# Altium footprint library Amin-Library.PcbLib: 601 footprints (part 16 of 38)
Each footprint in its own frame and in the unit in brackets; x right, y up, seen from the top. Pads: shape width x height; smd on the part's side, far side on the other; paste and mask are expansions set on the pad; w line width, h text height; cw(c..) or ccw(c..) is an arc to the next point about the centre after c.
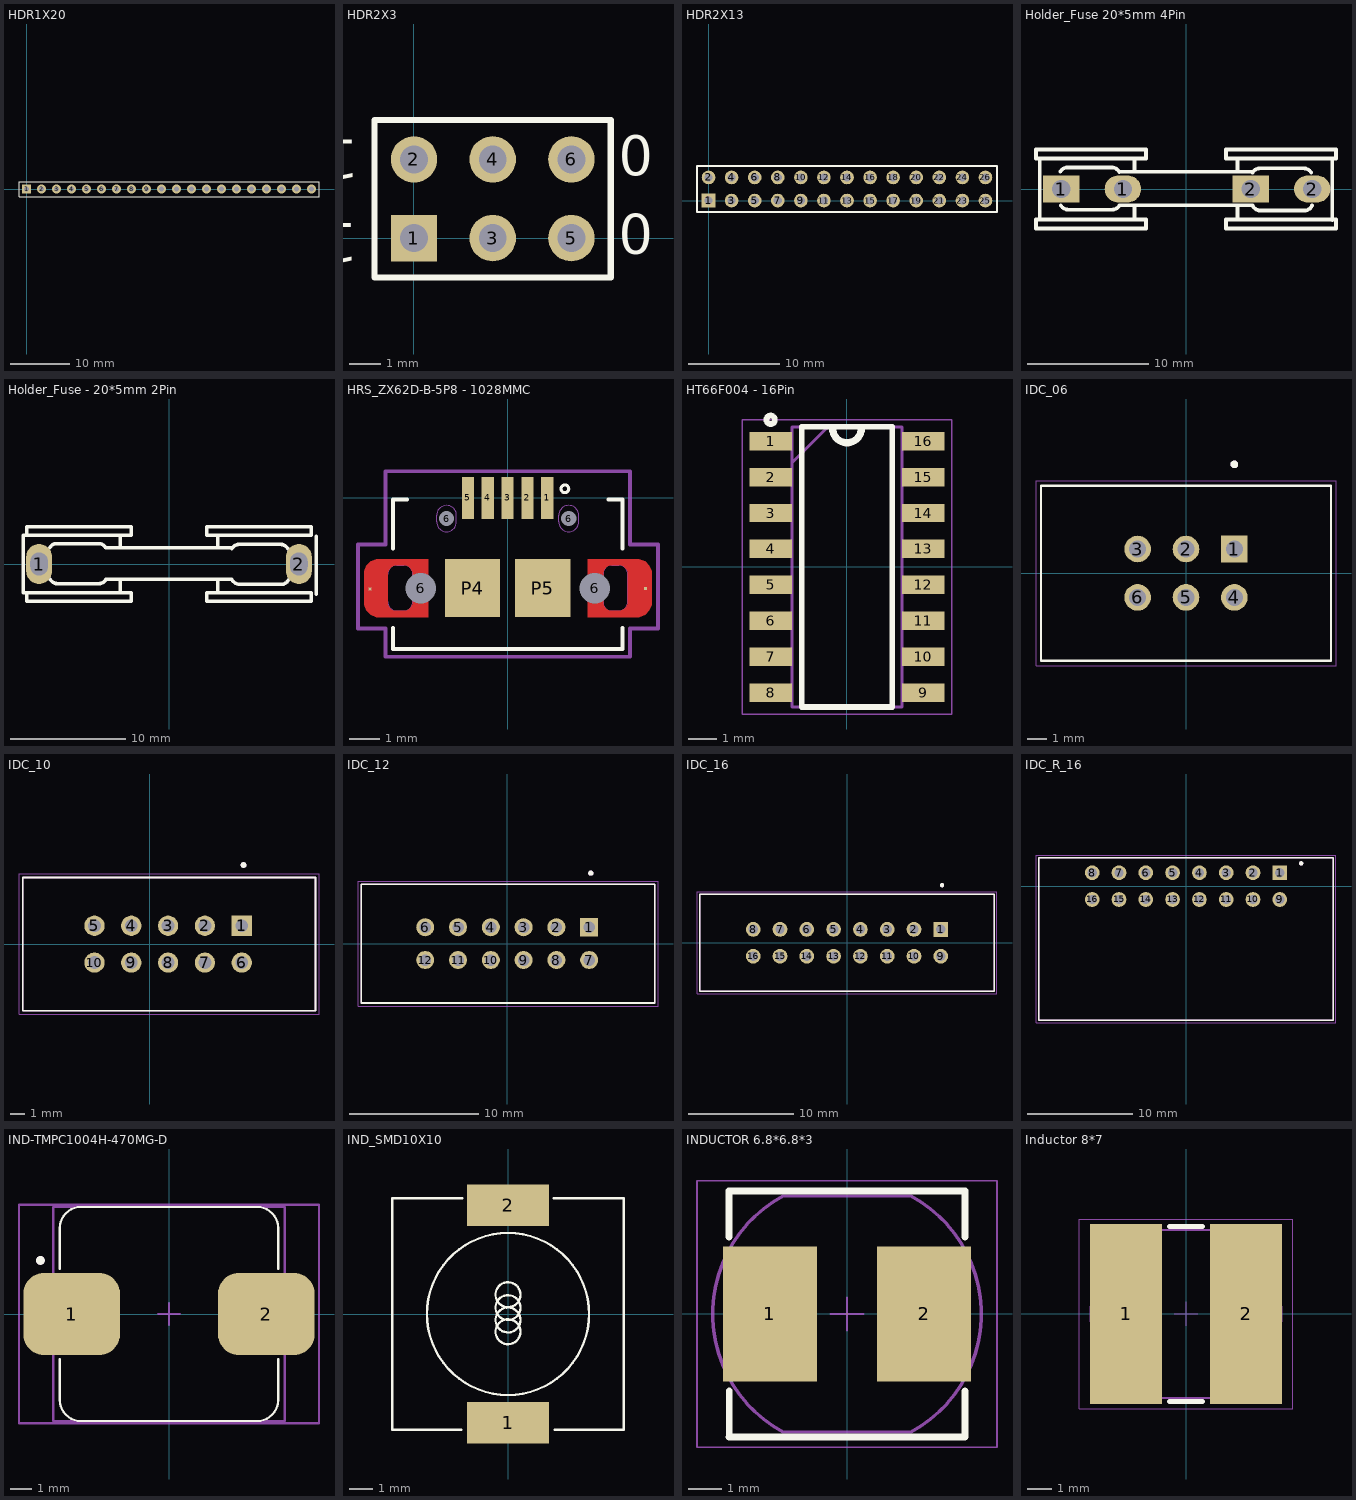
[diagram p15: the footprints below, top view; thin cyan lines are the x and y axes]

## HDR1X20 [mm] "Connector; Header; 20 Position"
height 4.32
pads (20):
  rect 1.5x1.5 hole 0.9: 1(0,0)
  round 1.5 hole 0.9: 2(2.54,0) 3(5.08,0) 4(7.62,0) 5(10.16,0) 6(12.7,0) 7(15.24,0) 8(17.78,0) 9(20.32,0) 10(22.86,0) 11(25.4,0) 12(27.94,0) 13(30.48,0) 14(33.02,0) 15(35.56,0) 16(38.1,0) 17(40.64,0) 18(43.18,0) 19(45.72,0) 20(48.26,0)
Top Overlay:
  lines w0.2: -1.27,-1.27 -1.27,1.27 0.635,1.27 49.53,1.27 49.53,-1.27 -1.27,-1.27

## HDR2X3 [mm] "Connector; Header; 3x2 Position"
height 4.32
pads (6):
  rect 1.5x1.5 hole 0.9: 1(0,0)
  round 1.5 hole 0.9: 2(0,2.54) 3(2.54,0) 4(2.54,2.54) 5(5.08,0) 6(5.08,2.54)
Top Overlay:
  lines w0.2: 1.482,-1.27 6.35,-1.27 ; 6.35,-1.27 6.35,3.81 -1.27,3.81 -1.27,-1.27 6.35,-1.27
  text "0" at 6.604,2.032 h1.27
  text "0" at 6.604,-0.508 h1.27
  text "1" at -1.778,3.175 h1.27
  text "1" at -1.807,0.486 h1.27
3D body "Header 2x3.stp": height 10.68, standoff -2.78, extent -1.27,-1.372 6.35,3.657

## HDR2X13 [mm] "Connector; Header; 13x2 Position"
pads (26):
  rect 1.5x1.5 hole 0.9: 1(0,0)
  round 1.5 hole 0.9: 2(0,2.54) 3(2.54,0) 4(2.54,2.54) 5(5.08,0) 6(5.08,2.54) 7(7.62,0) 8(7.62,2.54) 9(10.16,0) 10(10.16,2.54) 11(12.7,0) 12(12.7,2.54) 13(15.24,0) 14(15.24,2.54) 15(17.78,0) 16(17.78,2.54) 17(20.32,0) 18(20.32,2.54) 19(22.86,0) 20(22.86,2.54) 21(25.4,0) 22(25.4,2.54) 23(27.94,0) 24(27.94,2.54) 25(30.48,0) 26(30.48,2.54)
Top Overlay:
  lines w0.2: -1.27,-1.27 31.75,-1.27 31.75,3.81 -1.27,3.81 -1.27,-1.27

## Holder_Fuse 20*5mm 4Pin [mm]
height 16
pads (4):
  rect 3x2.25 hole 1.5: 1(-10.287,0) 2(5.334,0)
  oval 3x2.25 hole 1.5: 1(-5.207,0) 2(10.414,0)
Top Overlay:
  lines w0.305: -12.37,3.226 -12.37,2.515 -3.302,2.515 -3.302,3.251 -12.37,3.251 ; -12.065,-2.515 -12.065,2.515 ; -10.37,1.422 cw(c-9.754,1.067) -9.754,1.778 -8.687,1.778 -6.147,1.778 cw(c-6.147,1.041) -5.509,1.41 ; -10.341,-1.333 ccw(c-9.703,-0.965) -9.703,-1.702 ; -9.855,-1.702 -5.969,-1.702 ; -6.096,-1.702 ccw(c-6.096,-0.991) -5.48,-1.346 ; -5.512,1.422 5.537,1.422 ; -5.486,-1.346 5.461,-1.346 ; -4.242,-2.464 -4.242,-1.346 ; -4.242,1.448 -4.242,2.489 ; -3.302,-3.251 -12.37,-3.251 -12.37,-2.515 -3.302,-2.515 -3.302,-3.226 ; 3.302,3.226 3.302,2.515 12.37,2.515 12.37,3.251 3.302,3.251 ; 4.242,-2.489 4.242,-1.346 ; 4.242,1.422 4.242,2.464 ; 5.479,-1.353 ccw(c6.147,-1.041) 6.147,-1.778 8.687,-1.778 9.754,-1.778 ccw(c9.754,-1.067) 10.398,-1.367 ; 5.48,1.346 cw(c6.096,0.991) 6.096,1.702 ; 5.969,1.702 9.855,1.702 ; 9.703,1.702 cw(c9.703,0.965) 10.341,1.333 ; 12.065,-2.565 12.065,2.464 ; 12.37,-3.251 3.302,-3.251 3.302,-2.515 12.37,-2.515 12.37,-3.226
3D body "User Library-FH-103 fuse holder 6_4mm.step": height 10.7, standoff -2.99, extent 5.199,-3.632 13.201,3.378
3D body "User Library-FH-103 fuse holder 6_4mm.step": height 10.7, standoff -2.99, extent -13.074,-3.378 -5.072,3.632

## Holder_Fuse - 20*5mm 2Pin [mm]
height 16
pads (2):
  oval 2.25x3.5 hole 1.5 slot 2 at 90 deg: 1(-11.3,0) 2(11.3,0)
Top Overlay:
  lines w0.305: -12.37,-2.515 -12.37,-3.251 -3.302,-3.251 ; -12.37,2.515 -12.37,3.226 ; -12.37,3.251 -3.302,3.251 -3.302,2.515 -12.7,2.515 -12.7,-2.515 -3.302,-2.515 -3.302,-3.226 ; -10.37,1.422 cw(c-9.754,1.067) -9.754,1.778 -8.687,1.778 -6.147,1.778 cw(c-6.147,1.041) -5.509,1.41 ; -10.341,-1.333 ccw(c-9.703,-0.965) -9.703,-1.702 ; -9.855,-1.702 -5.969,-1.702 ; -6.096,-1.702 ccw(c-6.096,-0.991) -5.48,-1.346 ; -5.512,1.422 5.537,1.422 ; -5.486,-1.346 5.461,-1.346 ; -4.242,-2.464 -4.242,-1.346 ; -4.242,1.448 -4.242,2.489 ; 3.302,3.226 3.302,2.515 12.37,2.515 12.37,3.251 3.302,3.251 ; 4.242,-2.489 4.242,-1.346 ; 4.242,1.422 4.242,2.464 ; 5.479,-1.353 ccw(c6.147,-1.041) 6.147,-1.778 8.687,-1.778 9.754,-1.778 ccw(c9.754,-1.067) 10.398,-1.367 ; 5.48,1.346 cw(c6.096,0.991) 6.096,1.702 ; 5.969,1.702 9.855,1.702 ; 9.703,1.702 cw(c9.703,0.965) 10.341,1.333 ; 12.37,-3.251 3.302,-3.251 3.302,-2.515 12.37,-2.515 12.37,-3.226 ; 12.827,-2.616 12.827,2.413
3D body "User Library-Fuse_Holder_PCB.step": height 13.5, standoff -4.5, extent -12,-4.5 12,4.5

## HRS_ZX62D-B-5P8 - 1028MMC [mm]
pads (13):
  rect 0.4x1.372 smd: 1(1.3,0) 2(0.65,0) 3(0,0) 4(-0.65,0) 5(-1.3,0)
  round 0.61 hole 1: 6(-2.85,-2.95) 6(2.85,-2.95)
  round 0.406 hole 0.5: 6(-2,-0.675) 6(2,-0.675)
  rect 0.102x0.102 smd: P3(-4.513,-2.987) P6(4.521,-2.963)
  rect 1.803x1.905 smd: P4(-1.15,-2.95) P5(1.15,-2.95)
Top Layer:
  region: -2.6,-2 -4.2,-2 -4.299,-2 -4.483,-2.076 -4.624,-2.217 -4.7,-2.401 -4.7,-2.5 -4.7,-2.95 -3.925,-2.95 -3.925,-2.5 -3.919,-2.441 -3.874,-2.333 -3.792,-2.251 -3.684,-2.206 -3.625,-2.2 -3.4,-2.2 -3.341,-2.206 -3.233,-2.251 -3.151,-2.333 -3.106,-2.441 -3.1,-2.5 -3.1,-2.95 -2.6,-2.95
  region: 2.616,-3.9 4.216,-3.9 4.317,-3.901 4.503,-3.826 4.645,-3.685 4.724,-3.5 4.724,-3.4 4.724,-2.95 3.937,-2.95 3.937,-3.4 3.931,-3.459 3.885,-3.568 3.801,-3.65 3.691,-3.695 3.632,-3.7 3.404,-3.7 3.347,-3.692 3.244,-3.645 3.167,-3.563 3.128,-3.457 3.124,-3.4 3.124,-2.95 2.616,-2.95
  region: -3.1,-2.95 -2.6,-2.95 -2.6,-3.9 -4.2,-3.9 -4.299,-3.9 -4.483,-3.824 -4.624,-3.683 -4.7,-3.499 -4.7,-3.4 -4.7,-2.95 -3.925,-2.95 -3.925,-3.425 -3.92,-3.479 -3.879,-3.578 -3.803,-3.654 -3.704,-3.695 -3.65,-3.7 -3.4,-3.7 -3.341,-3.694 -3.233,-3.649 -3.151,-3.567 -3.106,-3.459 -3.1,-3.4
  region: 3.124,-2.95 2.616,-2.95 2.616,-2 4.216,-2 4.317,-1.999 4.503,-2.074 4.645,-2.215 4.724,-2.4 4.724,-2.5 4.724,-2.95 3.937,-2.95 3.937,-2.475 3.931,-2.421 3.889,-2.321 3.812,-2.245 3.712,-2.205 3.658,-2.2 3.404,-2.2 3.347,-2.208 3.244,-2.255 3.167,-2.337 3.128,-2.443 3.124,-2.5
Top Overlay:
  circle w0.1: c1.875,0.3 r0.127
  lines w0.127: -3.75,-4.25 -3.75,-4.95 3.759,-4.95 3.759,-4.25 ; -3.75,-1.65 -3.75,-0.046 -3.3,-0.046 ; 3.302,-0.046 3.759,-0.046 3.759,-1.65
Top Paste:
  region: -2.6,-2 -4.2,-2 -4.299,-2 -4.483,-2.076 -4.624,-2.217 -4.7,-2.401 -4.7,-2.5 -4.7,-2.95 -3.925,-2.95 -3.925,-2.5 -3.919,-2.441 -3.874,-2.333 -3.792,-2.251 -3.684,-2.206 -3.625,-2.2 -3.4,-2.2 -3.341,-2.206 -3.233,-2.251 -3.151,-2.333 -3.106,-2.441 -3.1,-2.5 -3.1,-2.95 -2.6,-2.95
  region: 2.616,-3.9 4.216,-3.9 4.317,-3.901 4.503,-3.826 4.645,-3.685 4.724,-3.5 4.724,-3.4 4.724,-2.95 3.937,-2.95 3.937,-3.4 3.931,-3.459 3.885,-3.568 3.801,-3.65 3.691,-3.695 3.632,-3.7 3.404,-3.7 3.347,-3.692 3.244,-3.645 3.167,-3.563 3.128,-3.457 3.124,-3.4 3.124,-2.95 2.616,-2.95
  region: -3.1,-2.95 -2.6,-2.95 -2.6,-3.9 -4.2,-3.9 -4.299,-3.9 -4.483,-3.824 -4.624,-3.683 -4.7,-3.499 -4.7,-3.4 -4.7,-2.95 -3.925,-2.95 -3.925,-3.425 -3.92,-3.479 -3.879,-3.578 -3.803,-3.654 -3.704,-3.695 -3.65,-3.7 -3.4,-3.7 -3.341,-3.694 -3.233,-3.649 -3.151,-3.567 -3.106,-3.459 -3.1,-3.4
  region: 3.124,-2.95 2.616,-2.95 2.616,-2 4.216,-2 4.317,-1.999 4.503,-2.074 4.645,-2.215 4.724,-2.4 4.724,-2.5 4.724,-2.95 3.937,-2.95 3.937,-2.475 3.931,-2.421 3.889,-2.321 3.812,-2.245 3.712,-2.205 3.658,-2.2 3.404,-2.2 3.347,-2.208 3.244,-2.255 3.167,-2.337 3.128,-2.443 3.124,-2.5
Top Solder:
  rectangle: -4.8,-4 -2.5,-1.9
  rectangle: 2.515,-4.001 4.801,-1.9
Mechanical 4:
Mechanical 11:
  lines w0.025: -3.925,-3.4 ccw(c-3.625,-3.4) -3.625,-3.7 -3.4,-3.7 ccw(c-3.4,-3.4) -3.1,-3.4 -3.1,-2.5 ccw(c-3.4,-2.5) -3.4,-2.2 -3.625,-2.2 ccw(c-3.625,-2.5) -3.925,-2.5 -3.925,-3.4 ; -2.325,-0.777 ccw(c-1.998,-0.778) -2,-1.105 ccw(c-2.002,-0.778) -1.675,-0.777 -1.675,-0.573 ccw(c-2.003,-0.571) -2,-0.243 ccw(c-1.997,-0.571) -2.325,-0.573 -2.325,-0.777 ; 1.67,-0.777 ccw(c1.999,-0.776) 2,-1.105 ccw(c2.001,-0.776) 2.33,-0.777 2.33,-0.573 ccw(c2,-0.573) 2,-0.243 ccw(c2,-0.573) 1.67,-0.573 1.67,-0.777 ; 3.124,-3.4 ccw(c3.414,-3.41) 3.404,-3.7 3.632,-3.7 ccw(c3.635,-3.398) 3.937,-3.4 3.937,-2.5 ccw(c3.635,-2.502) 3.632,-2.2 3.404,-2.2 ccw(c3.414,-2.49) 3.124,-2.5 3.124,-3.4
Mechanical 27:
  lines w0.127: -4.9,-4.275 -4.9,-1.525 -4,-1.525 -4,0.875 4.013,0.875 4.013,-1.525 4.925,-1.525 4.925,-4.275 4.013,-4.275 4.013,-5.2 -4,-5.2 -4,-4.275 -4.9,-4.275

## HT66F004 - 16Pin [mm] "NSOP-16"
height 22
pads (16):
  rect 1.5x0.65 smd: 1(-2.7,4.445) 2(-2.7,3.175) 3(-2.7,1.905) 4(-2.7,0.635) 5(-2.7,-0.635) 6(-2.7,-1.905) 7(-2.7,-3.175) 8(-2.7,-4.445) 9(2.7,-4.445) 10(2.7,-3.175) 11(2.7,-1.905) 12(2.7,-0.635) 13(2.7,0.635) 14(2.7,1.905) 15(2.7,3.175) 16(2.7,4.445)
Top Overlay:
  circle w0.2: c-2.7,5.2 r0.15
  lines w0.2: -1.6,-4.95 1.6,-4.95 1.6,4.95 -1.6,4.95 -1.6,-4.95
  lines w0.254: -0.508,4.897 ccw(c0,4.897) 0.508,4.897
Mechanical 13:
  lines w0.1: -1.95,3.68 -0.68,4.95 ; -1.95,-4.95 1.95,-4.95 1.95,4.95 -1.95,4.95 -1.95,-4.95
Mechanical 15:
  lines w0.05: -3.7,-5.2 3.7,-5.2 3.7,5.2 -3.7,5.2 -3.7,-5.2
3D body "BS816A-1.stp": height 1.75, standoff 0, extent -3,-4.95 3,4.95

## IDC_06 [mm]
pads (6):
  rect 1.398x1.398 hole 0.89: 1(2.54,1.27)
  round 1.398 hole 0.89: 2(0,1.27) 3(-2.54,1.27) 4(2.54,-1.27) 5(0,-1.27) 6(-2.54,-1.27)
Top Overlay:
  circle w0.2: c2.54,5.715 r0.1
  lines w0.127: -7.61,-4.595 7.61,-4.595 7.61,4.595 -7.61,4.595 -7.61,-4.595
Mechanical 4:
  circle w0.2: c2.54,5.715 r0.1
  circle w0.2: c2.54,5.715 r0.1
Mechanical 16:
  lines w0.05: -7.874,-4.845 7.874,-4.845 7.874,4.845 -7.874,4.845 -7.874,-4.845
3D body "User Library-BH-06 (IDC-06MS) (1).step": height 9, standoff -3, extent -7.61,-4.539 7.61,4.561

## IDC_10 [mm]
pads (10):
  rect 1.398x1.398 hole 0.89: 1(6.35,1.27)
  round 1.398 hole 0.89: 2(3.81,1.27) 3(1.27,1.27) 4(-1.27,1.27) 5(-3.81,1.27) 6(6.35,-1.27) 7(3.81,-1.27) 8(1.27,-1.27) 9(-1.27,-1.27) 10(-3.81,-1.27)
Top Overlay:
  circle w0.2: c6.477,5.461 r0.1
  lines w0.127: -8.763,-4.595 -8.763,4.595 11.43,4.595 11.43,-4.595 -8.763,-4.595
Mechanical 4:
  circle w0.2: c6.477,5.461 r0.1
  circle w0.2: c6.477,5.461 r0.1
  lines w0.127: -8.763,-4.595 -8.763,4.595 ; -8.763,-4.595 11.43,-4.595 ; -8.763,-4.595 -8.763,4.595 ; -8.763,-4.595 11.43,-4.595 ; -8.763,4.595 11.43,4.595 ; -8.763,4.595 11.43,4.595 ; 11.43,-4.595 11.43,4.595 ; 11.43,-4.595 11.43,4.595
Mechanical 16:
  lines w0.05: -9.017,-4.845 -9.017,4.845 11.68,4.845 11.68,-4.845 -9.017,-4.845
3D body "User Library-IDC Socket Male 10pin Straight THT Goldplated 2_54mm.step": height 8.91, standoff -3.49, extent -8.87,-4.425 11.43,4.425

## IDC_12 [mm]
pads (12):
  rect 1.398x1.398 hole 0.89: 1(6.35,1.27)
  round 1.398 hole 0.89: 2(3.81,1.27) 3(1.27,1.27) 4(-1.27,1.27) 5(-3.81,1.27) 6(-6.35,1.27) 7(6.35,-1.27) 8(3.81,-1.27) 9(1.27,-1.27) 10(-1.27,-1.27) 11(-3.81,-1.27) 12(-6.35,-1.27)
Top Overlay:
  circle w0.2: c6.477,5.461 r0.1
  lines w0.127: -11.303,-4.595 11.43,-4.595 11.43,4.595 -11.303,4.595 -11.303,-4.595
Mechanical 4:
  circle w0.2: c6.477,5.461 r0.1
  circle w0.2: c6.477,5.461 r0.1
  lines w0.127: -11.303,-4.595 11.43,-4.595 ; -11.303,-4.595 -11.303,4.595 ; -11.303,-4.595 11.43,-4.595 ; -11.303,-4.595 -11.303,4.595 ; -11.303,4.595 11.43,4.595 ; -11.303,4.595 11.43,4.595 ; 11.43,-4.595 11.43,4.595 ; 11.43,-4.595 11.43,4.595
Mechanical 16:
  lines w0.05: -11.557,-4.845 11.68,-4.845 11.68,4.845 -11.557,4.845 -11.557,-4.845
3D body "User Library-IDC Socket Male 12pin Straight THT Goldplated 2_54mm.SLDPRT": height 8.91, standoff -3.49, extent -11.357,-4.595 11.484,4.255

## IDC_16 [mm]
pads (16):
  rect 1.398x1.398 hole 0.89: 1(8.89,1.27)
  round 1.398 hole 0.89: 2(6.35,1.27) 3(3.81,1.27) 4(1.27,1.27) 5(-1.27,1.27) 6(-3.81,1.27) 7(-6.35,1.27) 8(-8.89,1.27) 9(8.89,-1.27) 10(6.35,-1.27) 11(3.81,-1.27) 12(1.27,-1.27) 13(-1.27,-1.27) 14(-3.81,-1.27) 15(-6.35,-1.27) 16(-8.89,-1.27)
Top Overlay:
  circle w0.2: c9.017,5.461 r0.1
  lines w0.127: -13.97,-4.595 13.97,-4.595 13.97,4.595 -13.97,4.595 -13.97,-4.595
Mechanical 4:
  circle w0.2: c9.017,5.461 r0.1
  circle w0.2: c9.017,5.461 r0.1
  lines w0.127: -13.97,-4.595 13.97,-4.595 ; -13.97,-4.595 -13.97,4.595 ; -13.97,-4.595 13.97,-4.595 ; -13.97,-4.595 -13.97,4.595 ; -13.97,4.595 13.97,4.595 ; -13.97,4.595 13.97,4.595 ; 13.97,-4.595 13.97,4.595 ; 13.97,-4.595 13.97,4.595
Mechanical 16:
  lines w0.05: -14.22,-4.845 14.22,-4.845 14.22,4.845 -14.22,4.845 -14.22,-4.845
3D body "DS1013-16S (IDC-16MS CONNFLY).stp": height 9, standoff -3.6, extent -14.06,-4.455 14.06,4.445

## IDC_R_16 [mm]
pads (16):
  rect 1.398x1.398 hole 0.89: 1(8.89,1.27)
  round 1.398 hole 0.89: 2(6.35,1.27) 3(3.81,1.27) 4(1.27,1.27) 5(-1.27,1.27) 6(-3.81,1.27) 7(-6.35,1.27) 8(-8.89,1.27) 9(8.89,-1.27) 10(6.35,-1.27) 11(3.81,-1.27) 12(1.27,-1.27) 13(-1.27,-1.27) 14(-3.81,-1.27) 15(-6.35,-1.27) 16(-8.89,-1.27)
Top Overlay:
  circle w0.2: c10.922,2.159 r0.1
  lines w0.127: -13.97,-12.7 -13.97,2.667 13.97,2.667 13.97,-12.7 -13.97,-12.7
Mechanical 4:
  circle w0.2: c10.922,2.159 r0.1
  circle w0.2: c10.922,2.159 r0.1
  lines w0.127: -13.97,-12.7 -13.97,2.667 ; -13.97,-12.7 13.97,-12.7 ; -13.97,-12.7 -13.97,2.667 ; -13.97,-12.7 13.97,-12.7 ; -13.97,2.667 13.97,2.667 ; -13.97,2.667 13.97,2.667 ; 13.97,-12.7 13.97,2.667 ; 13.97,-12.7 13.97,2.667
Mechanical 16:
  lines w0.05: -14.22,-12.954 -14.22,2.921 14.22,2.921 14.22,-12.954 -14.22,-12.954
3D body "DS1013-16R (IDC-16R CONNFLY).stp": height 8.9, standoff -3, extent -14.06,-12.496 14.06,1.524

## IND-TMPC1004H-470MG-D [mm]
pads (2):
  rrect50% 4.51x3.85 smd mask+0.05: 1(-4.545,0) 2(4.545,0)
Top Overlay:
  circle w0.21: c-6,2.5 r0.1
  lines w0.1: -5.1,-2.1 -5.1,-4 ccw(c-4.1,-4) -4.1,-5 4.1,-5 ccw(c4.1,-4) 5.1,-4 5.1,-2.1 ; -5.1,2.1 -5.1,4 cw(c-4.1,4) -4.1,5 4.1,5 cw(c4.1,4) 5.1,4 5.1,2.1
Mechanical 13:
  circle w0.21: c-6,2.5 r0.1
  lines w0.1: 5.4,2.1 5.4,5 5.1,5 -5.4,5 -5.4,3.5 -5.4,-5 5.4,-5 5.4,-3.3 5.4,2.4
Mechanical 15:
  lines w0.1: -0.5,0 0.5,0 ; 0,-0.5 0,0.5 ; -7,-5.1 -5.2,-5.1 7,-5.1 7,5.1 -7,5.1 -7,1.4 -7,-5.1
3D body "ETQP4M6R8KVC.STEP": height 4.01, standoff 0.01, extent -5.4,-5 5.4,5

## IND_SMD10X10 [mm]
pads (2):
  rect 3.56x1.78 smd: 1(0,-4.7) 2(0,4.7)
Top Overlay:
  circle w0.1: c0,0.834 r0.539
  circle w0.1: c0,0.275 r0.539
  circle w0.1: c0,-0.258 r0.539
  circle w0.1: c0,-0.766 r0.539
  circle w0.1: c0,0 r3.5
  lines w0.1: -2.007,-5 -5,-5 ; -1.981,5 -5,5 ; 1.981,5 5,5 5,-5 2.007,-5 ; -5,-5 -5,5 ; -5,-5 -5,5
3D body "User Library-B82464G4.STEP": height 4.91, standoff 0.1, extent -5.212,-5.2 5.188,5.2

## INDUCTOR 6.8*6.8*3 [mm] "Inductor, 2-Leads"
height 5
pads (2):
  rect 2.8x4 smd paste-2: 1(-2.286,0) 2(2.286,0)
Top Overlay:
  lines w0.2: -3.5,-3.65 3.5,-3.65 3.5,-2.286 ; -3.5,2.286 -3.5,3.654 ; -3.5,3.65 3.5,3.65 ; -3.495,-3.654 -3.495,-2.286 ; 3.5,2.286 3.5,3.654
Top Paste:
  rectangle: -3.495,-0.25 -1.095,0.25
  rectangle: -3.495,-1.012 -1.095,-0.512
  rectangle: -3.495,-1.774 -1.095,-1.274
  rectangle: -3.495,0.512 -1.095,1.012
  rectangle: -3.495,1.274 -1.095,1.774
  rectangle: 1.077,-0.25 3.477,0.25
  rectangle: 1.077,-1.012 3.477,-0.512
  rectangle: 1.077,-1.774 3.477,-1.274
  rectangle: 1.077,0.512 3.477,1.012
  rectangle: 1.077,1.274 3.477,1.774
Mechanical 13:
  lines w0.1: -1.9,-3.5 cw(c0,0) -1.9,3.5 1.9,3.5 cw(c0,0) 1.9,-3.5 -1.9,-3.5
Mechanical 15:
  lines w0.05: -0.5,0 0.5,0 ; 0,-0.5 0,0.5 ; -4.45,-3.95 -4.45,3.95 4.45,3.95 4.45,-3.95 -4.45,-3.95
3D body "Sensor_744775360.stp": height 5, standoff -0.01, extent -3.947,-3.5 3.938,3.5

## Inductor 8*7 [mm] "Inductor, 2-Leads"
height 5
pads (2):
  rect 3x7.5 smd: 1(-2.5,0) 2(2.5,0)
Top Overlay:
  lines w0.2: -0.7,-3.65 0.7,-3.65 ; -0.7,3.65 0.7,3.65
Mechanical 13:
  lines w0.1: -1.9,-3.5 cw(c0,0) -1.9,3.5 1.9,3.5 cw(c0,0) 1.9,-3.5 -1.9,-3.5
Mechanical 15:
  lines w0.05: -0.5,0 0.5,0 ; 0,-0.5 0,0.5 ; -4.45,-3.95 4.45,-3.95 4.45,3.95 -4.45,3.95 -4.45,-3.95
3D body "Sensor_744775360.stp": height 5, standoff -0.01, extent -3.947,-3.5 3.938,3.5